# Altium schematic symbol library 2019-09-10_20-46-16.SchLib: 2 symbols
Pins are listed as number, name and electrical type; pins without a type are passive.

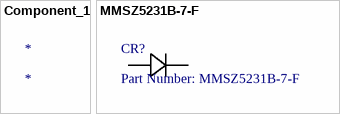
[diagram p0: symbols Component_1 to MMSZ5231B-7-F]

## Component_1
designator *

## MMSZ5231B-7-F
designator CR?, comment Part Number: MMSZ5231B-7-F
No Description Available; Vendor: Diodes Inc; Built_By: EMA_UL_Team; Type: DEV; Manufacturer_Part_Number: MMSZ5231B-7-F; Copyright: Copyright (C) 2018 Accelerated Designs. All rights reserved; RefDes: RefDes; Value: Value
footprint SOD123
pins: 1, 2